# Altium footprint library PcbLib.PcbLib: 65 footprints (part 1 of 5)
Each footprint in its own frame and in the unit in brackets; x right, y up, seen from the top. Pads: shape width x height; smd on the part's side, far side on the other; paste and mask are expansions set on the pad; w line width, h text height; cw(c..) or ccw(c..) is an arc to the next point about the centre after c.
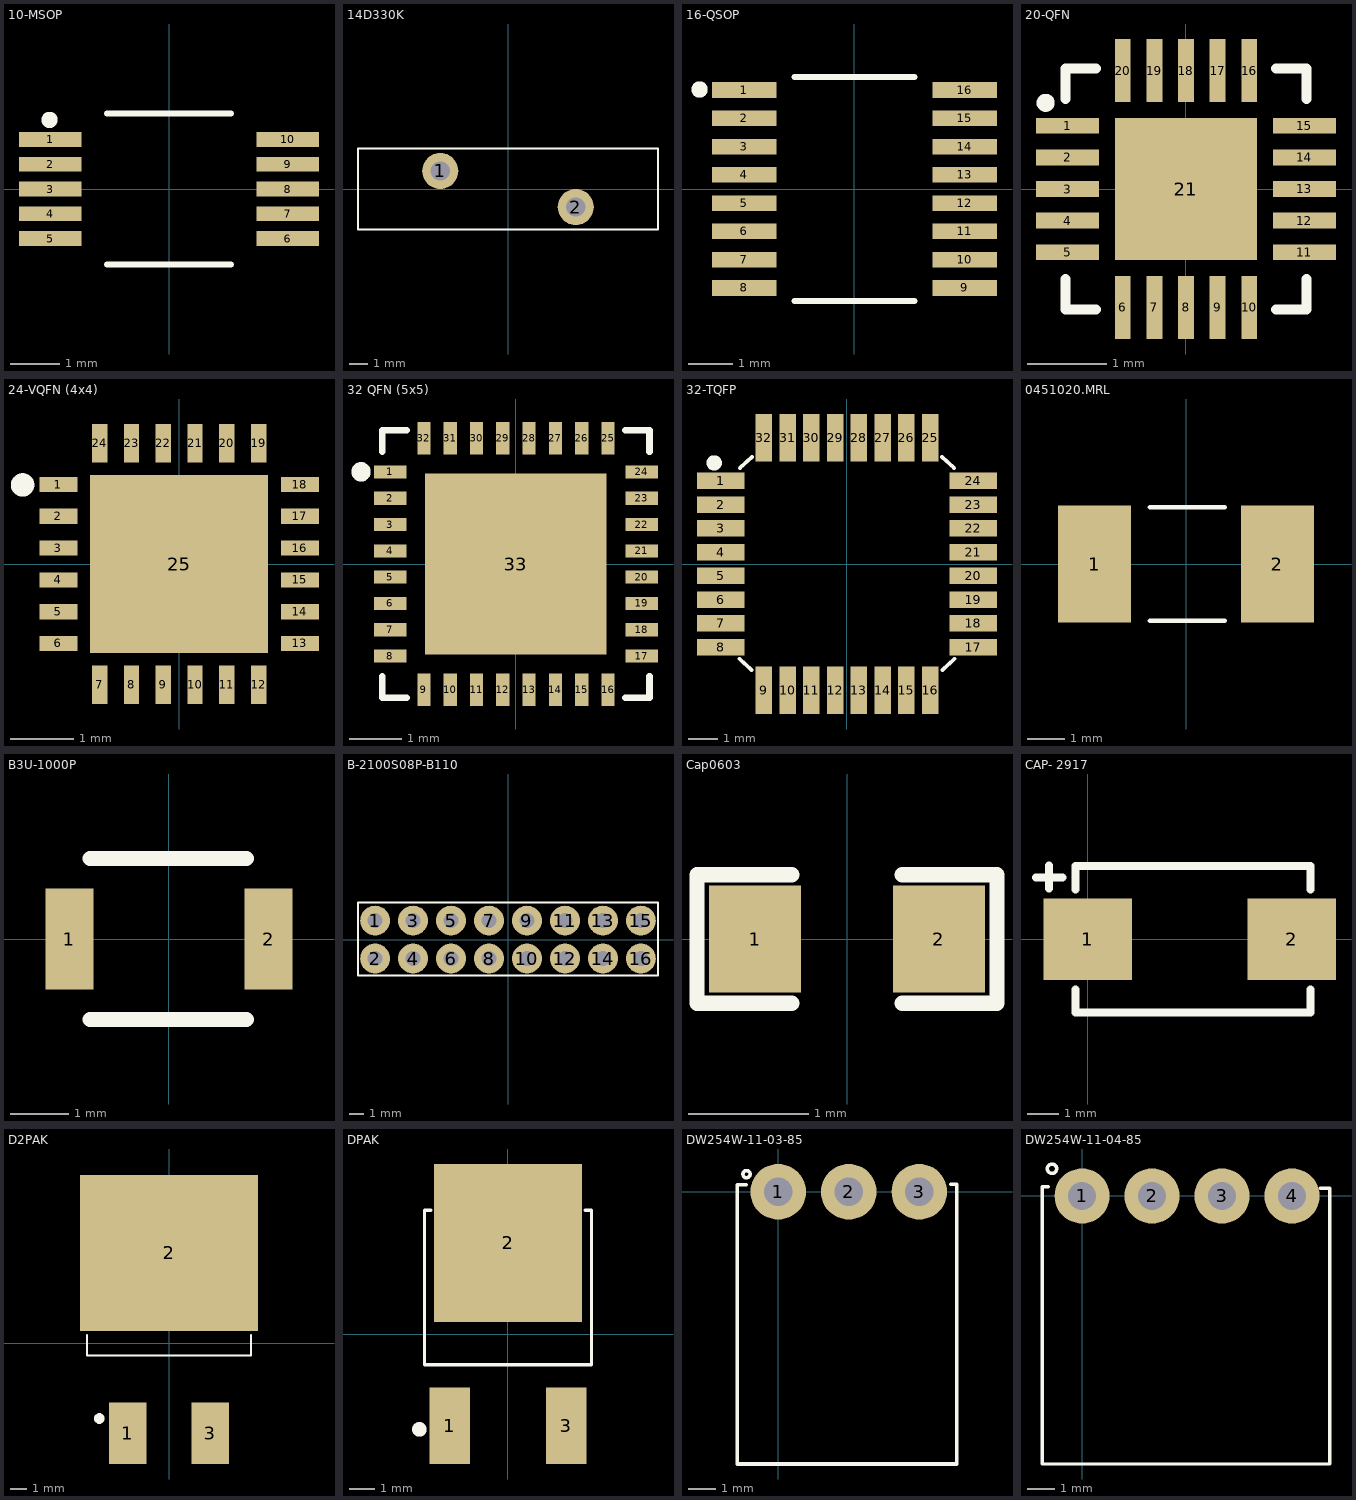
[diagram p0: the footprints below, top view; thin cyan lines are the x and y axes]

## 10-MSOP [mm]
pads (10):
  rect 1.26x0.3 smd: 1(-2.4,1) 2(-2.4,0.5) 3(-2.4,0) 4(-2.4,-0.5) 5(-2.4,-1) 6(2.4,-1) 7(2.4,-0.5) 8(2.4,0) 9(2.4,0.5) 10(2.4,1)
Top Overlay:
  circle w0.254: c-2.413,1.397 r0.036
  lines w0.127: -1.245,-1.524 1.245,-1.524 ; -1.245,1.524 1.245,1.524
3D body "User Library-AD5170BRMZ100-ND.step": height 1, standoff 0, extent -2.464,-1.5 2.464,1.5

## 14D330K [mm]
pads (2):
  round 2 hole 1.06: 1(-3.75,1) 2(3.75,-1)
Top Overlay:
  lines w0.127: 8.306,2.235 8.306,-2.246 -8.306,-2.246 -8.306,2.246 8.306,2.246
3D body "step_temp.STEP": height 20, standoff -20, extent -8.25,-2.2 8.25,2.2

## 16-QSOP [mm]
pads (16):
  rect 1.45x0.35 smd: 1(-2.475,2.222) 2(-2.475,1.587) 3(-2.475,0.953) 4(-2.475,0.318) 5(-2.475,-0.318) 6(-2.475,-0.953) 7(-2.475,-1.587) 8(-2.475,-2.222) 9(2.475,-2.222) 10(2.475,-1.587) 11(2.475,-0.953) 12(2.475,-0.318) 13(2.475,0.318) 14(2.475,0.953) 15(2.475,1.587) 16(2.475,2.222)
Top Overlay:
  circle w0.254: c-3.48,2.235 r0.057
  lines w0.127: -1.346,-2.515 1.346,-2.515 ; -1.346,2.515 1.346,2.515
3D body "QSOP16_MC_MCH.step": height 1.76, standoff 0, extent -2.997,-2.451 2.997,2.451

## 20-QFN [mm] "IC MCU 8BIT 16KB FLASH 20VQFN"
pads (21):
  rect 0.8x0.2 smd: 1(-1.5,0.8) 2(-1.5,0.4) 3(-1.5,0) 4(-1.5,-0.4) 5(-1.5,-0.8) 11(1.5,-0.8) 12(1.5,-0.4) 13(1.5,0) 14(1.5,0.4) 15(1.5,0.8)
  rect 0.2x0.8 smd: 6(-0.8,-1.5) 7(-0.4,-1.5) 8(0,-1.5) 9(0.4,-1.5) 10(0.8,-1.5) 16(0.8,1.5) 17(0.4,1.5) 18(0,1.5) 19(-0.4,1.5) 20(-0.8,1.5)
  rect 1.8x1.8 smd: 21(0,0)
Top Overlay:
  circle w0.127: c-1.778,1.092 r0.051
  lines w0.127: -1.524,-1.143 -1.524,-1.524 -1.143,-1.524 ; -1.524,1.143 -1.524,1.524 -1.143,1.524 ; 1.143,-1.524 1.524,-1.524 1.524,-1.143 ; 1.143,1.524 1.524,1.524 1.524,1.143
3D body "VQFN20_3X3_MCH.step": height 0.59, standoff 0, extent -1.499,-1.499 1.499,1.499

## 24-VQFN (4x4) [mm]
pads (25):
  rect 0.6x0.24 smd: 1(-1.9,1.25) 2(-1.9,0.75) 3(-1.9,0.25) 4(-1.9,-0.25) 5(-1.9,-0.75) 6(-1.9,-1.25) 13(1.9,-1.25) 14(1.9,-0.75) 15(1.9,-0.25) 16(1.9,0.25) 17(1.9,0.75) 18(1.9,1.25)
  rect 0.24x0.6 smd: 7(-1.25,-1.9) 8(-0.75,-1.9) 9(-0.25,-1.9) 10(0.25,-1.9) 11(0.75,-1.9) 12(1.25,-1.9) 19(1.25,1.9) 20(0.75,1.9) 21(0.25,1.9) 22(-0.25,1.9) 23(-0.75,1.9) 24(-1.25,1.9)
  rect 2.8x2.8 smd: 25(0,0)
Top Overlay:
  circle w0.254: c-2.464,1.245 r0.057
3D body "DRV8701PRGER.STEP": height 1, standoff 0, extent -2,-2 2,2

## 32 QFN (5x5) [mm]
pads (33):
  rect 0.62x0.25 smd: 1(-2.39,1.75) 2(-2.39,1.25) 3(-2.39,0.75) 4(-2.39,0.25) 5(-2.39,-0.25) 6(-2.39,-0.75) 7(-2.39,-1.25) 8(-2.39,-1.75) 17(2.39,-1.75) 18(2.39,-1.25) 19(2.39,-0.75) 20(2.39,-0.25) 21(2.39,0.25) 22(2.39,0.75) 23(2.39,1.25) 24(2.39,1.75)
  rect 0.25x0.62 smd: 9(-1.75,-2.39) 10(-1.25,-2.39) 11(-0.75,-2.39) 12(-0.25,-2.39) 13(0.25,-2.39) 14(0.75,-2.39) 15(1.25,-2.39) 16(1.75,-2.39) 25(1.75,2.39) 26(1.25,2.39) 27(0.75,2.39) 28(0.25,2.39) 29(-0.25,2.39) 30(-0.75,2.39) 31(-1.25,2.39) 32(-1.75,2.39)
  rect 3.45x3.45 smd: 33(0,0)
Top Overlay:
  circle w0.254: c-2.946,1.753 r0.057
  lines w0.127: -2.54,-2.134 -2.54,-2.54 -2.083,-2.54 ; -2.54,2.134 -2.54,2.54 -2.083,2.54 ; 2.083,-2.54 2.54,-2.54 2.54,-2.134 ; 2.083,2.54 2.54,2.54 2.54,2.134
3D body "DRV8702DQRHBTQ1.stp": height 0.9, standoff 0, extent -2.5,-2.5 2.5,2.5

## 32-TQFP [mm]
pads (32):
  rect 1.6x0.55 smd: 1(-4.25,2.8) 2(-4.25,2) 3(-4.25,1.2) 4(-4.25,0.4) 5(-4.25,-0.4) 6(-4.25,-1.2) 7(-4.25,-2) 8(-4.25,-2.8) 17(4.25,-2.8) 18(4.25,-2) 19(4.25,-1.2) 20(4.25,-0.4) 21(4.25,0.4) 22(4.25,1.2) 23(4.25,2) 24(4.25,2.8)
  rect 0.55x1.6 smd: 9(-2.8,-4.25) 10(-2,-4.25) 11(-1.2,-4.25) 12(-0.4,-4.25) 13(0.4,-4.25) 14(1.2,-4.25) 15(2,-4.25) 16(2.8,-4.25) 25(2.8,4.25) 26(2,4.25) 27(1.2,4.25) 28(0.4,4.25) 29(-0.4,4.25) 30(-1.2,4.25) 31(-2,4.25) 32(-2.8,4.25)
Top Overlay:
  circle w0.254: c-4.47,3.404 r0.13
  lines w0.127: -3.621,-3.189 -3.215,-3.57 ; -3.607,3.226 -3.2,3.607 ; 3.2,3.607 3.607,3.226 ; 3.215,-3.57 3.621,-3.189
3D body "ATMEGA168A-AU.STEP": height 1.18, standoff -0.02, extent -4.5,-4.5 4.5,4.5

## 0451020.MRL [mm]
pads (2):
  rect 1.96x3.15 smd: 1(-2.45,0) 2(2.45,0)
Top Overlay:
  lines w0.127: -0.965,-1.524 1.041,-1.524 ; -0.965,1.524 1.041,1.524
3D body "0451020.MRL.STEP": height 1.35, standoff -1.35, extent -3.05,-1.467 3.05,1.473

## B3U-1000P [mm] "SWITCH TACTILE SPST-NO 0.05A 12V"
pads (2):
  rect 0.82x1.72 smd: 1(-1.7,0) 2(1.7,0)
Top Overlay:
  lines w0.254: -1.346,-1.372 0,-1.372 1.321,-1.372 ; -1.346,1.372 0,1.372 1.321,1.372
3D body "User Library-OMRON B3U1000P.step": height 1.6, standoff 0, extent -2,-1.263 2,1.237

## B-2100S08P-B110 [mm] "Straight 2.54mm 6mm -40?~+105? 2 3mm 8 2.54mm Black Brass 2x4P 2.54mm Plugin,P=2.54mm Pin Headers"
pads (16):
  round 2 hole 1.02: 1(-8.89,1.27) 2(-8.89,-1.27) 3(-6.35,1.27) 4(-6.35,-1.27) 5(-3.81,1.27) 6(-3.81,-1.27) 7(-1.27,1.27) 8(-1.27,-1.27) 9(1.27,1.27) 10(1.27,-1.27) 11(3.81,1.27) 12(3.81,-1.27) 13(6.35,1.27) 14(6.35,-1.27) 15(8.89,1.27) 16(8.89,-1.27)
Top Overlay:
  lines w0.127: -10.033,-2.413 10.033,-2.413 10.033,2.489 -10.033,2.489 -10.033,-2.413
3D body "146257-8.stp": height 7.84, standoff -3.33, extent -9.957,-2.438 9.957,2.438

## Cap0603 [mil]
pads (2):
  rect 30x35 smd mask+2.36: 1(-30,0) 2(30,0)
Top Overlay:
  lines w5: -18,-21 -49,-21 -49,21 -18,21 ; 18,-21 49,-21 49,21 18,21
3D body "User Library-CAPC1608X09.step": height 34.25, standoff -1.18, extent -31.51,-15.75 31.49,15.74

## CAP- 2917 [mm]
pads (2):
  rect 2.79x2.57 smd: 1(0,0) 2(6.44,0)
Top Overlay:
  lines w0.254: -1.631,1.956 -0.793,1.956 ; -1.225,1.6 -1.225,2.337 ; -0.387,-1.575 -0.387,-2.311 7.03,-2.311 7.03,-1.575 ; -0.387,1.575 -0.387,2.311 7.03,2.311 7.03,1.575
3D body "593D D-CASE.stp": height 2.88, standoff -0.04, extent -0.273,-2.207 6.916,2.21

## D2PAK [mm]
pads (3):
  rect 2.32x3.81 smd: 1(-2.54,-5.585) 3(2.54,-5.585)
  rect 11x9.65 smd: 2(0,5.585)
Top Overlay:
  circle w0.5: c-4.318,-4.674 r0.076
  lines w0.127: -5.08,0.483 -5.08,-0.762 5.08,-0.762 5.08,0.483
3D body "D2PAK-2 L7805.step": height 5.08, standoff 0, extent -5,-5.968 5,9.656

## DPAK [mm]
pads (3):
  rect 1.6x3 smd: 1(-2.285,-3.59) 3(2.285,-3.59)
  rect 5.8x6.2 smd: 2(0,3.59)
Top Overlay:
  circle w0.5: c-3.48,-3.734 r0.036
  lines w0.127: -3.023,4.877 -3.277,4.877 -3.277,-1.194 3.277,-1.194 3.277,4.877 3.023,4.877
3D body "MC7805BDTRKG.STEP": height 2.51, standoff -0.01, extent -3.277,-3.988 3.223,5.918

## DW254W-11-03-85 [mm] "3 pin  2.54mm 3A  Female Headers ROHS"
pads (3):
  round 2 hole 1.02: 1(0,0) 2(2.54,0) 3(5.08,0)
Top Overlay:
  circle w0.127: c-1.143,0.635 r0.13
  lines w0.127: -1.153,0.254 -1.473,0.254 -1.473,-9.804 6.426,-9.804 6.426,0.268 6.214,0.268
3D body "female_header_a-bl254-ea-g03d.stp": height 2.45, standoff -3.25, extent -1.42,-9.719 6.45,0.341

## DW254W-11-04-85 [mm] "2.54mm 3A Shrouded 1x4P side 8.5mm 4 1 Square Holes Plugin,P=2.54mm Female Headers ROHS"
pads (4):
  round 2 hole 1.02: 1(0,0) 2(2.54,0) 3(5.08,0) 4(7.62,0)
Top Overlay:
  circle w0.127: c-1.092,0.991 r0.17
  lines w0.127: -1.219,0.33 -1.448,0.33 -1.448,-9.728 8.992,-9.728 8.992,0.279 8.636,0.279
3D body "female_header_a-bl254-ea-g04d.stp": height 2.8, standoff -2.9, extent -1.42,-9.719 8.99,0.341